# EAGLE library part 206-4ST (library 206-4ST)
Check availability <https://pricing.snapeda.com/parts/206-4ST/CTS%20CORP/view-part?ref=eda>
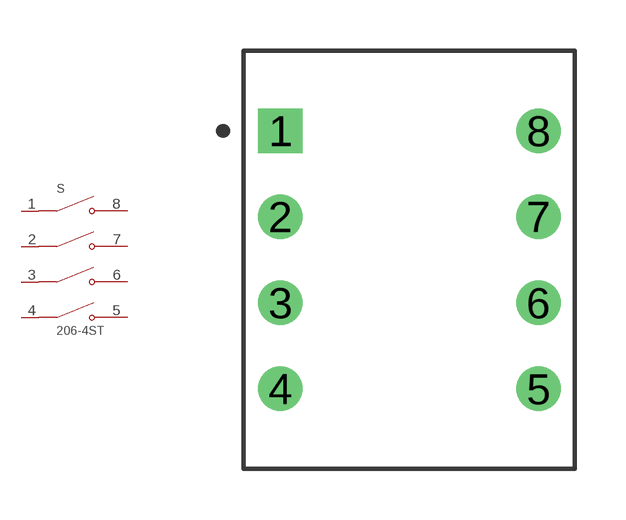
[diagram p0: symbol with the pads of SW_206-4ST; footprint SW_206-4ST]

Designator prefix S

## 206-4ST (Availability: In Stock; Check_prices: https://www.snapeda.com/parts/206-4ST/CTS+Components/view-part/?ref=eda; Description: Switch DIP OFF ON SPST 4 Raised Slide 0.05A 24VDC PC Pins 10000Cycles 2.54mm Thru-Hole Tube; MF: CTS CORP; MP: 206-4ST; Package: None; Price: None; Purchase-URL: https://www.snapeda.com/api/url_track_click_mouser/?unipart_id=6308842&manufacturer=CTS CORP&part_name=206-4ST&search_term=206-4st; SnapEDA_Link: https://www.snapeda.com/parts/206-4ST/CTS+Components/view-part/?ref=snap)  [SW_206-4ST]
1  COM1  pas
2  COM2  pas
3  COM3  pas
4  COM4  pas
5  NO4  pas
6  NO3  pas
7  NO2  pas
8  NO1  pas

## Footprint SW_206-4ST (pad centres in mm)
drill 0.8 square: 1 -3.81,3.81
drill 0.8: 2 -3.81,1.27; 3 -3.81,-1.27; 4 -3.81,-3.81; 5 3.81,-3.81; 6 3.81,-1.27; 7 3.81,1.27; 8 3.81,3.81